# Altium footprint library CONN_22035045_MOL.PcbLib: 1 footprints
Each footprint in its own frame and in the unit in brackets; x right, y up, seen from the top. Pads: shape width x height; smd on the part's side, far side on the other; paste and mask are expansions set on the pad; w line width, h text height; cw(c..) or ccw(c..) is an arc to the next point about the centre after c.
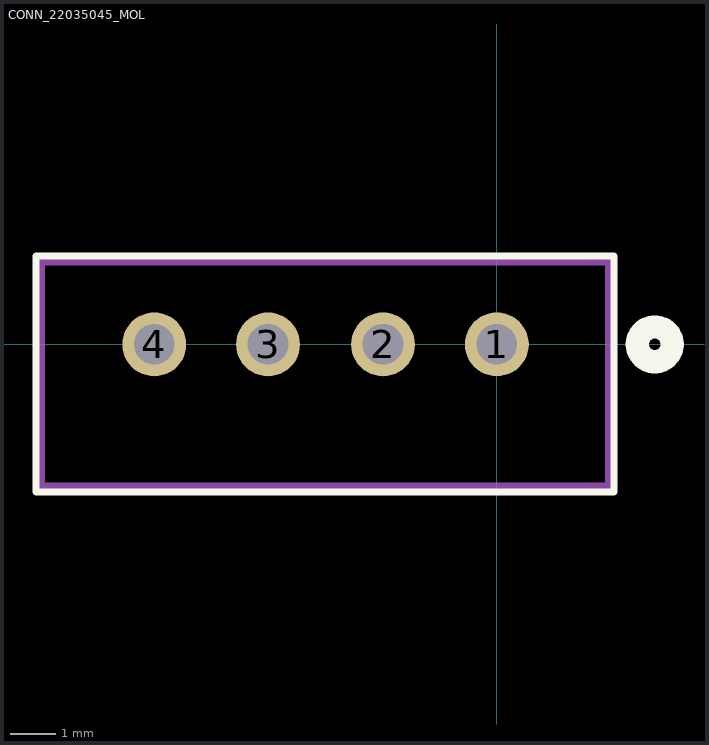
[diagram p0: the footprint, top view; thin cyan lines are the x and y axes]

## CONN_22035045_MOL [mil]
pads (4):
  round 55 hole 35 mask+4.02: 1(0,0) 2(-98,0) 3(-197,0) 4(-295,0)
Top Overlay:
  lines w6: -397,-127 101,-127 101,76 -397,76 -397,-127
  lines w20: 121,0 ccw(c136,0) 151,0 ccw(c136,0) 121,0
Bottom Overlay:
  lines w20: 121,0 ccw(c136,0) 151,0 ccw(c136,0) 121,0
Assembly Top:
  lines w6: -392,-122 96,-122 96,71 -392,71 -392,-122
  lines w20: -15,0 ccw(c0,0) 15,0 ccw(c0,0) -15,0